# Altium footprint library Resistor$.PcbLib: 99 footprints (part 4 of 7)
Each footprint in its own frame and in the unit in brackets; x right, y up, seen from the top. Pads: shape width x height; smd on the part's side, far side on the other; paste and mask are expansions set on the pad; w line width, h text height; cw(c..) or ccw(c..) is an arc to the next point about the centre after c.
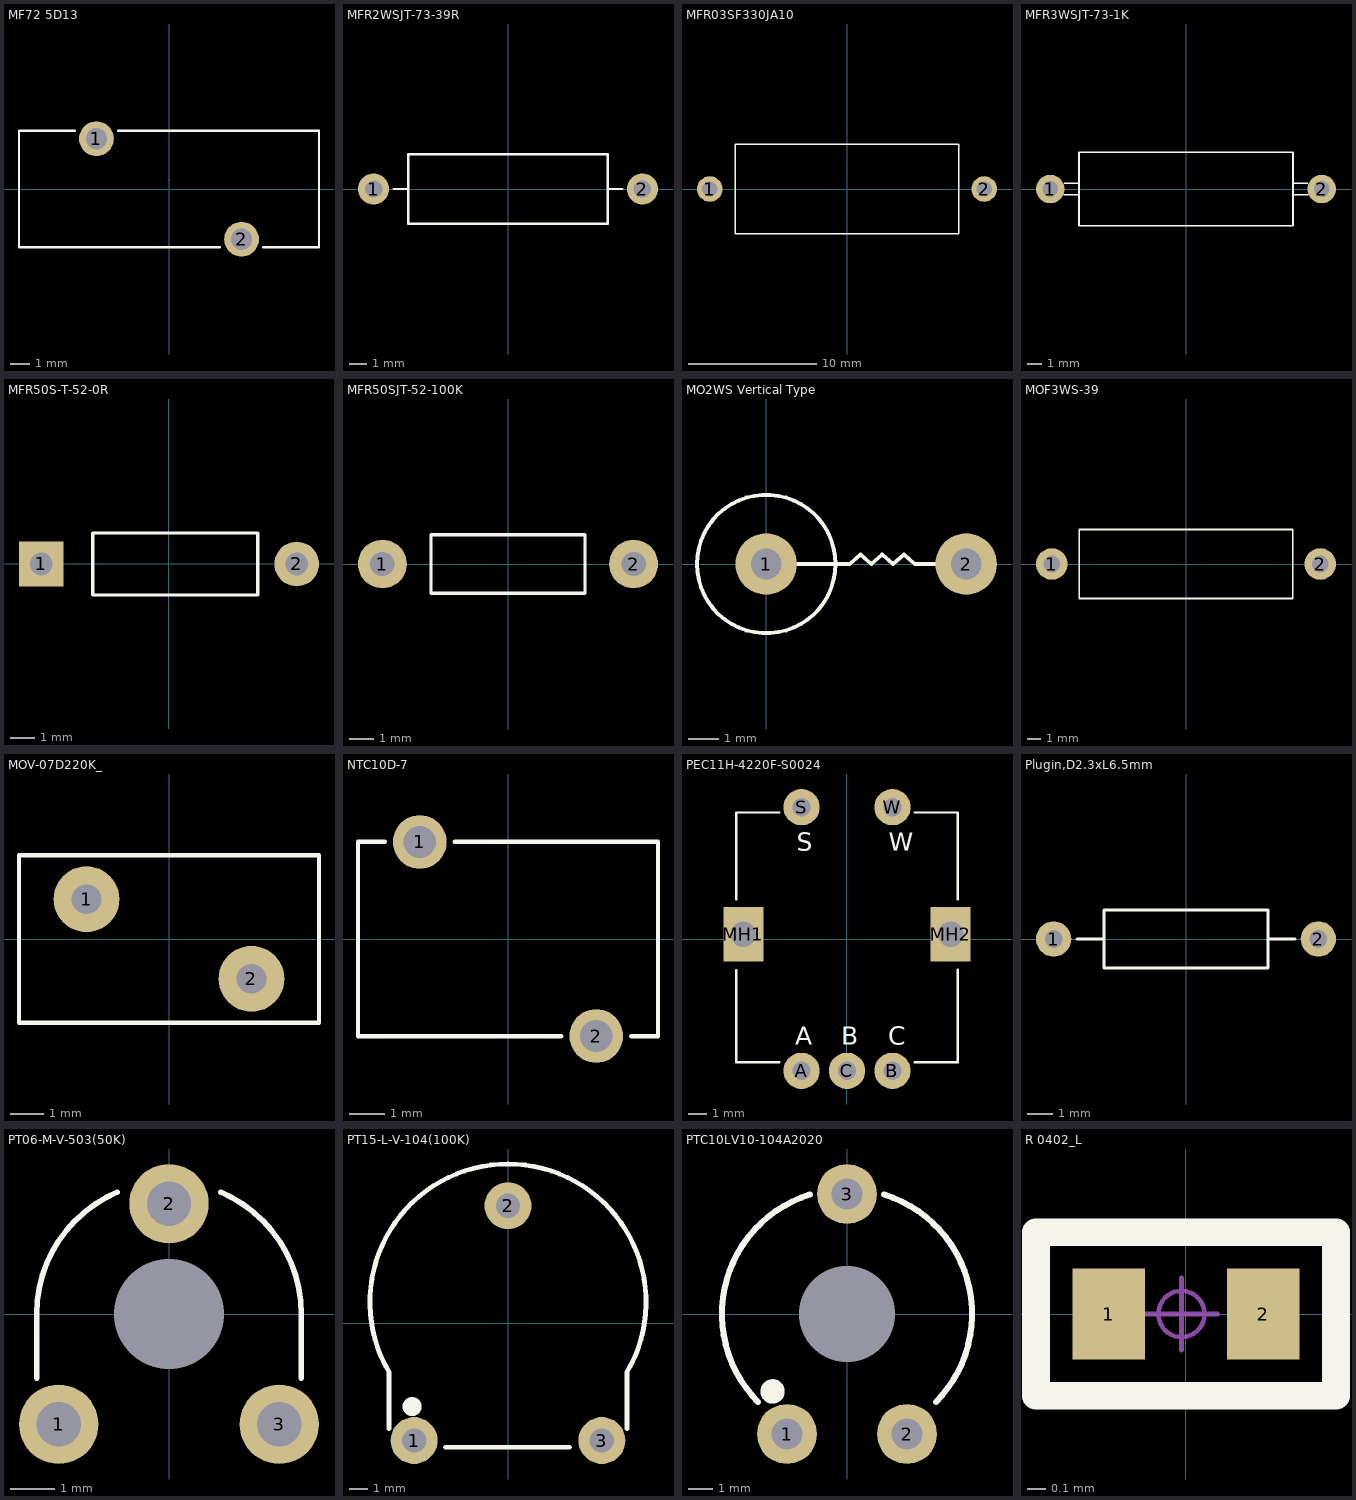
[diagram p3: the footprints below, top view; thin cyan lines are the x and y axes]

## MF72 5D13 [mm]
pads (2):
  round 1.8 hole 1.1 paste-2539.97 mask+0.051: 1(-3.75,2.6) 2(3.75,-2.6)
Top Overlay:
  lines w0.127: -4.881,3 -7.75,3 -7.75,-3 2.619,-3 ; -2.619,3 7.75,3 7.75,-3 4.881,-3
Mechanical 15:
  lines w0.003: 0,0.44 0,0.441
3D body "C72683.step": height 19.59, standoff -3.15, extent -7.735,-3.74 7.736,3.74

## MFR2WSJT-73-39R [mm]
pads (2):
  round 1.8 hole 1 paste-2539.97 mask+0.051: 1(-7.75,0) 2(7.75,0)
Top Overlay:
  lines w0.127: -6.605,0 -5.843,0 ; 5.841,0 6.603,0 ; -5.75,-2 5.75,-2 5.75,2 -5.75,2 -5.75,-2
3D body "C176578.step": height 4.01, standoff -3.5, extent -8.05,-1.999 8.05,1.999

## MFR03SF330JA10 [mm]
pads (2):
  round 2 hole 1.2 paste-2539.97 mask+0.051: 1(-10.75,0) 2(10.75,0)
Top Overlay:
  lines w0.127: -8.75,-3.5 8.75,-3.5 8.75,3.5 -8.75,3.5 -8.75,-3.5
3D body "C58749.step": height 6, standoff -5, extent -11.125,-3 11.125,3

## MFR3WSJT-73-1K [mm]
pads (2):
  round 2 hole 1.1 paste-2539.97 mask+0.051: 1(-9.5,0) 2(9.5,0)
Top Overlay:
  lines w0.127: -8.55,-0.4 -7.5,-0.4 ; -8.5,0.4 -7.5,0.4 ; -7.5,2.565 -7.5,-2.565 7.5,-2.565 7.5,2.565 ; -7.5,2.571 7.5,2.571 ; 7.5,-0.4 8.55,-0.4 ; 7.5,0.4 8.5,0.4
3D body "C176599.step": height 5.01, standoff -3.5, extent -10.3,-2.51 10.3,2.51

## MFR50S-T-52-0R [mm]
pads (2):
  rect 1.8x1.8 hole 0.92: 1(-5.15,0)
  round 1.8 hole 0.92: 2(5.15,0)
Top Overlay:
  lines w0.127: -3.073,-1.245 -3.073,1.245 3.581,1.245 3.581,-1.245 -3.073,-1.245
3D body "mfr50s-t-52-0r_asm_wpcb.stp": height 2.4, standoff -5, extent -5.425,-1.191 5.425,1.191

## MFR50SJT-52-100K [mm]
pads (2):
  round 2 hole 1 paste-2539.97 mask+0.051: 1(-5.15,0) 2(5.15,0)
Top Overlay:
  lines w0.127: -3.15,-1.2 3.15,-1.2 3.15,1.2 -3.15,1.2 -3.15,-1.2
3D body "C176621.step": height 2.4, standoff -5, extent -5.425,-1.191 5.425,1.191

## MO2WS Vertical Type [mm]
pads (2):
  round 2 hole 1: 1(0,0) 2(6.5,0)
Top Overlay:
  circle w0.127: c0,0 r2.25
  lines w0.127: 0,0 2.692,0 ; 2.711,0 3.064,0.308 3.416,0 3.769,0.308 4.121,0 4.474,0.308 4.826,0 6.5,0
3D body "MO2WS-10O±5..STEP": height 15.22, standoff -3.6, extent -2.261,-2.293 7.415,2.261

## MOF3WS-39 [mm]
pads (2):
  round 2.3 hole 1.2 paste-2539.97 mask+0.051: 1(-9.75,0) 2(9.75,0)
Top Overlay:
  lines w0.127: -7.75,-2.5 -7.75,2.5 7.75,2.5 7.75,-2.5 -7.75,-2.5
3D body "C121798.step": height 5.01, standoff -3.5, extent -10.05,-2.51 10.05,2.51

## MOV-07D220K_ [mm]
pads (2):
  round 2 hole 0.9: 1(-2.5,1.206) 2(2.5,-1.206)
Top Overlay:
  lines w0.127: -4.547,-2.54 -4.547,2.54 4.547,2.54 4.547,-2.54 -4.547,-2.54
3D body "MOV-07D471K--3DModel-STEP-56544.STEP": height 12.5, standoff -16.5, extent -4.5,-2.5 4.5,2.5

## NTC10D-7 [mil]
pads (2):
  round 60 hole 36 paste-99999 mask+2: 1(-98.42,108.27) 2(98.42,-108.27)
Top Overlay:
  lines w5: -137.53,108.27 -167.33,108.27 -167.33,-108.27 59.32,-108.27 ; -59.33,108.27 167.31,108.27 167.31,-108.27 137.52,-108.27
3D body "C9176.step": height 466.3, standoff -133.86, extent -167.04,-127.6 167.32,127.6

## PEC11H-4220F-S0024 [mm]
pads (7):
  round 2 hole 1: A(-2.5,-7.25) B(2.5,-7.25) C(0,-7.25) S(-2.5,7.25) W(2.5,7.25)
  rect 2.2x3 hole 1.4 square: MH1(-5.7,0.25) MH2(5.7,0.25)
Top Overlay:
  lines w0.127: -6.096,-1.727 -6.096,-6.782 -3.708,-6.782 ; -6.096,2.184 -6.096,6.96 -3.708,6.96 ; 3.708,-6.782 6.096,-6.782 6.096,-1.676 ; 3.708,6.96 6.096,6.96 6.096,2.184
  text "S" at -2.772,4.848 h1
  text "W" at 2.283,4.848 h1
  text "B" at -0.308,-5.82 h1
  text "A" at -2.848,-5.82 h1
  text "C" at 2.257,-5.82 h1
3D body "PEC11H-4220F-S0024.STEP": height 26.5, standoff -3.54, extent -6.8,-7.425 6.8,7.425

## Plugin,D2.3xL6.5mm [mm]
pads (2):
  round 1.4 hole 0.7 paste-2539.97 mask+0.051: 1(-5.25,0) 2(5.25,0)
Top Overlay:
  lines w0.127: -4.319,0 -3.25,0 ; 3.25,-1.15 -3.25,-1.15 -3.25,1.15 3.25,1.15 ; 3.25,-1.12 3.25,1.12 ; 3.25,-0.004 4.319,-0.004
3D body "C713997.step": height 2.31, standoff -3.5, extent -5.47,-1.152 5.48,1.152

## PT06-M-V-503(50K) [mm]
pads (4):
  round 1.8 hole 1: 1(-2.5,-2.5) 2(0,2.5) 3(2.5,-2.5)
  round 0 hole 2.5 unplated: MH(0,0)
Top Overlay:
  lines w0.127: -3,-1.451 -3,0 cw(c0,0) -1.171,2.762 ; 1.171,2.762 cw(c0,0) 3,0 3,-1.451
3D body "PT06-503 50K.STEP": height 4.15, standoff -3.3, extent -3.147,-3.162 3.147,3.199

## PT15-L-V-104(100K) [mm]
pads (3):
  round 2.5 hole 1.3: 1(-5,-6.25) 2(0,6.25) 3(5,-6.25)
Top Overlay:
  circle w0.5: c-5.105,-4.445 r0.259
  lines w0.254: -6.34,-5.629 -6.34,-2.601 cw(c0,1.118) 6.34,-2.601 6.34,-5.629 ; -3.327,-6.604 3.277,-6.604
3D body "pt15-l-v-104_100k.stp": height 7.2, standoff -3.59, extent -7.35,-6.532 7.35,8.456

## PTC10LV10-104A2020 [mm]
pads (4):
  round 2.5 hole 1.3: 1(-2.5,-5) 2(2.5,-5) 3(0,5)
  round 0 hole 4 unplated: MH(0,0)
Top Overlay:
  circle w0.5: c-3.104,-3.226 r0.259
  lines w0.254: -3.7,-3.672 cw(c0,0) -1.551,4.977 ; 1.551,4.977 cw(c0,0) 3.7,-3.672
3D body "PT10_PTC10_10LV10.STEP": height 6.32, standoff -3.4, extent -5.148,-5.474 5.145,5.154

## R 0402_L [mm]
pads (2):
  rect 0.4x0.5 smd: 1(-0.425,0) 2(0.425,0)
Top Overlay:
  lines w0.152: -0.825,-0.45 0.825,-0.45 0.825,0.45 -0.825,0.45 -0.825,-0.45
Mechanical 15:
  circle w0.025: c-0.025,0 r0.127
  lines w0.025: -0.225,0 0.175,0 ; -0.025,-0.2 -0.025,0.2
3D body "R 0402.STEP": height 0.3, standoff 0, extent -0.525,-0.25 0.475,0.25